# EAGLE library part SN74AUP3G14DCUR (library astra)
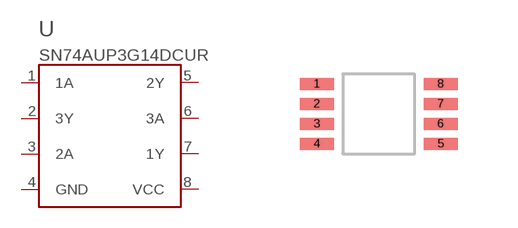
[diagram p14: symbol with the pads of TI_DCU8_KEY; footprint TI_DCU8_KEY]

Designator prefix U

## SN74AUP3G14DCUR  [TI_DCU8_KEY]
1  1A  in
2  3Y  out
3  2A  in
4  GND  pwr
5  2Y  out
6  3A  in
7  1Y  out
8  VCC  pwr

## Footprint TI_DCU8_KEY (pad centres in mm)
TI SN74AUP3G14 DCU0008A VSSOP board layout.
smd 0.85 x 0.3: 1 -1.55,0.75; 2 -1.55,0.25; 3 -1.55,-0.25; 4 -1.55,-0.75; 5 1.55,-0.75; 6 1.55,-0.25; 7 1.55,0.25; 8 1.55,0.75